# Altium footprint library Control_PCB_Lib.PcbLib: 28 footprints (part 1 of 2)
Each footprint in its own frame and in the unit in brackets; x right, y up, seen from the top. Pads: shape width x height; smd on the part's side, far side on the other; paste and mask are expansions set on the pad; w line width, h text height; cw(c..) or ccw(c..) is an arc to the next point about the centre after c.
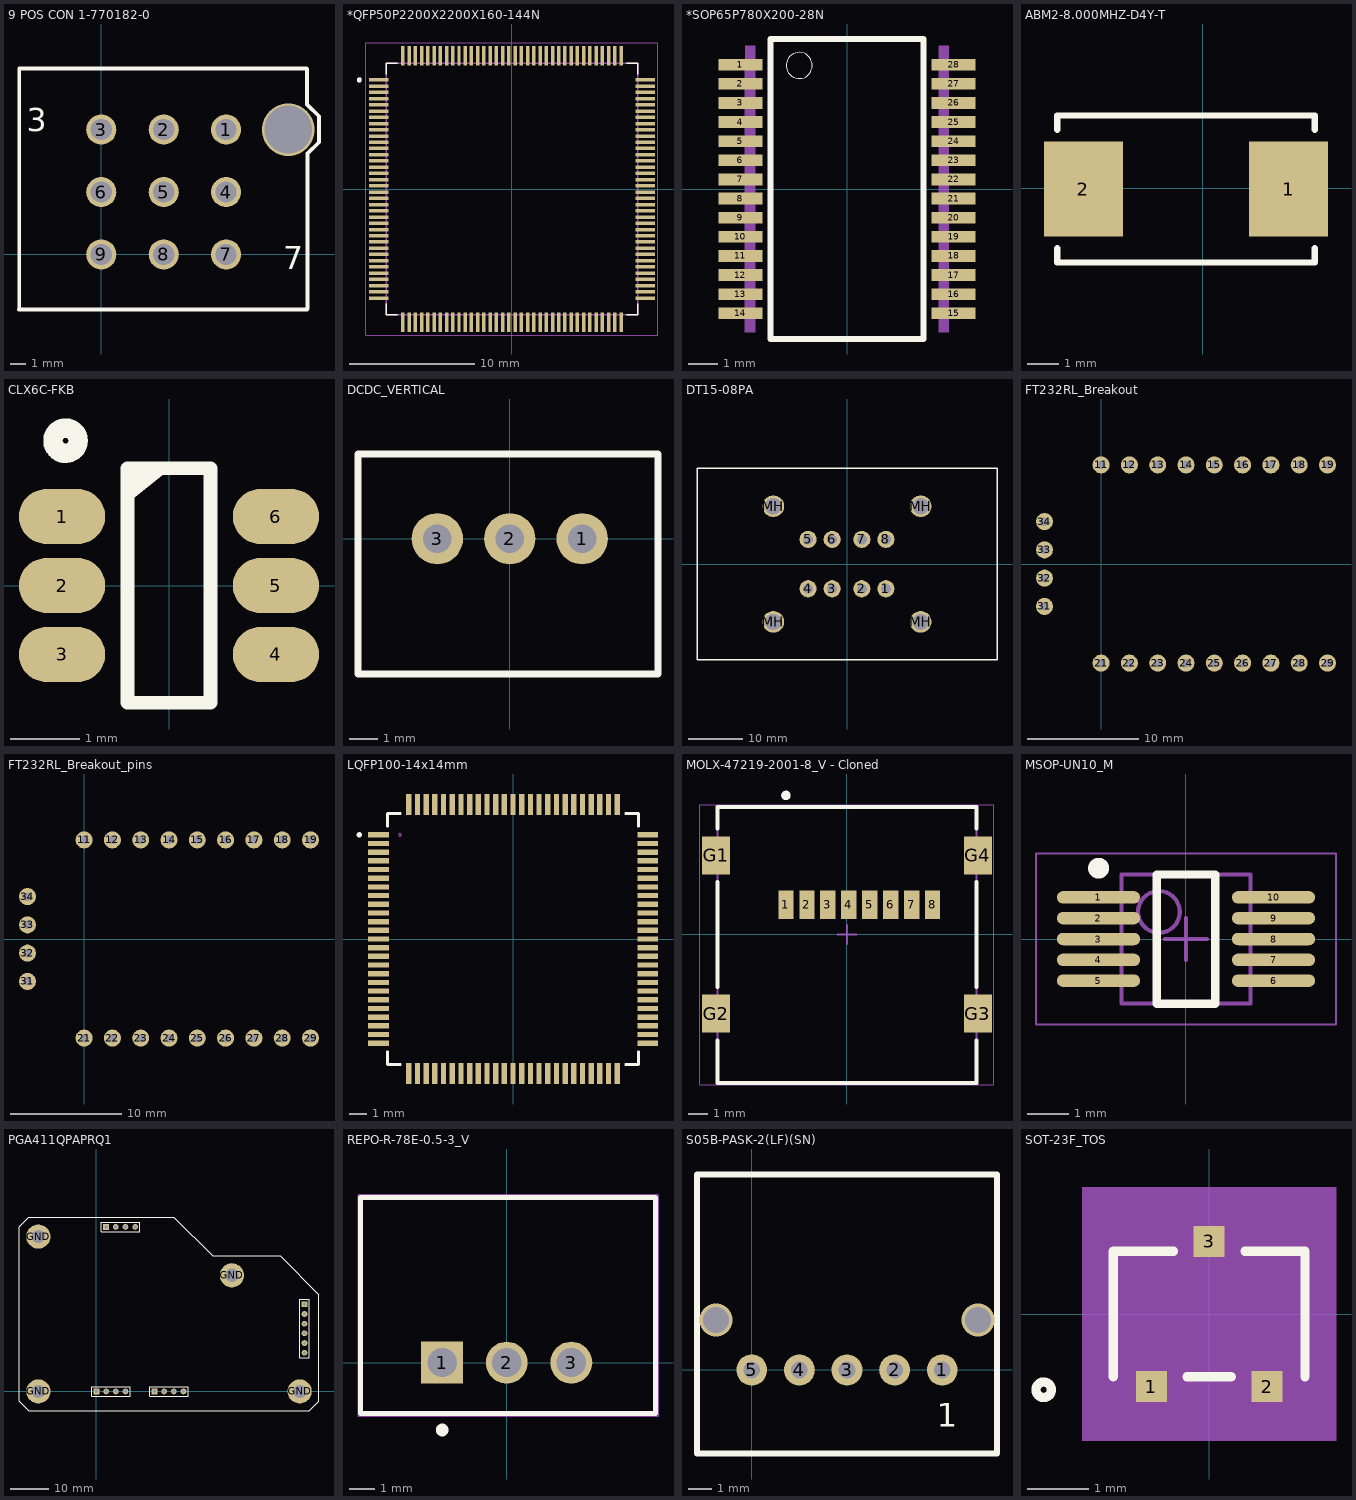
[diagram p0: the footprints below, top view; thin cyan lines are the x and y axes]

## 9 POS CON 1-770182-0 [mm] "TE CONN HEADER VERT 9POS 4.14MM"
height 13.49
pads (9):
  round 2 hole 1.4: 1(8.28,8.28) 2(4.14,8.28) 3(0,8.28) 4(8.28,4.14) 5(4.14,4.14) 6(0,4.14) 7(8.28,0) 8(4.14,0) 9(0,0)
via 12.4,8.28 diameter 3.5 hole 3.18
Top Overlay:
  lines w0.254: -5.443,12.326 13.607,12.326 ; -5.443,12.335 -5.443,-3.634 -5.459,-3.649 13.638,-3.649 13.689,-3.598 13.689,6.696 14.442,7.448 14.442,7.792 14.434,7.784 14.434,9.165 13.653,9.947 13.653,12.321
  text "3" at -4.957,8.164 h1.52
  text "7" at 12.058,-0.977 h1.52
3D body "c-1-770182-0-n-3d.stp": height 14.55, standoff -4.02, extent -5.476,-3.647 13.676,12.38

## *QFP50P2200X2200X160-144N [mm]
pads (144):
  rect 1.56x0.28 smd: 1(-10.68,8.75) 2(-10.68,8.25) 3(-10.68,7.75) 4(-10.68,7.25) 5(-10.68,6.75) 6(-10.68,6.25) 7(-10.68,5.75) 8(-10.68,5.25) 9(-10.68,4.75) 10(-10.68,4.25) 11(-10.68,3.75) 12(-10.68,3.25) 13(-10.68,2.75) 14(-10.68,2.25) 15(-10.68,1.75) 16(-10.68,1.25) 17(-10.68,0.75) 18(-10.68,0.25) 19(-10.68,-0.25) 20(-10.68,-0.75) 21(-10.68,-1.25) 22(-10.68,-1.75) 23(-10.68,-2.25) 24(-10.68,-2.75) 25(-10.68,-3.25) 26(-10.68,-3.75) 27(-10.68,-4.25) 28(-10.68,-4.75) 29(-10.68,-5.25) 30(-10.68,-5.75) 31(-10.68,-6.25) 32(-10.68,-6.75) 33(-10.68,-7.25) 34(-10.68,-7.75) 35(-10.68,-8.25) 36(-10.68,-8.75) 73(10.68,-8.75) 74(10.68,-8.25) 75(10.68,-7.75) 76(10.68,-7.25) 77(10.68,-6.75) 78(10.68,-6.25) 79(10.68,-5.75) 80(10.68,-5.25) 81(10.68,-4.75) 82(10.68,-4.25) 83(10.68,-3.75) 84(10.68,-3.25) 85(10.68,-2.75) 86(10.68,-2.25) 87(10.68,-1.75) 88(10.68,-1.25) 89(10.68,-0.75) 90(10.68,-0.25) 91(10.68,0.25) 92(10.68,0.75) 93(10.68,1.25) 94(10.68,1.75) 95(10.68,2.25) 96(10.68,2.75) 97(10.68,3.25) 98(10.68,3.75) 99(10.68,4.25) 100(10.68,4.75) 101(10.68,5.25) 102(10.68,5.75) 103(10.68,6.25) 104(10.68,6.75) 105(10.68,7.25) 106(10.68,7.75) 107(10.68,8.25) 108(10.68,8.75)
  rect 0.28x1.56 smd: 37(-8.75,-10.68) 38(-8.25,-10.68) 39(-7.75,-10.68) 40(-7.25,-10.68) 41(-6.75,-10.68) 42(-6.25,-10.68) 43(-5.75,-10.68) 44(-5.25,-10.68) 45(-4.75,-10.68) 46(-4.25,-10.68) 47(-3.75,-10.68) 48(-3.25,-10.68) 49(-2.75,-10.68) 50(-2.25,-10.68) 51(-1.75,-10.68) 52(-1.25,-10.68) 53(-0.75,-10.68) 54(-0.25,-10.68) 55(0.25,-10.68) 56(0.75,-10.68) 57(1.25,-10.68) 58(1.75,-10.68) 59(2.25,-10.68) 60(2.75,-10.68) 61(3.25,-10.68) 62(3.75,-10.68) 63(4.25,-10.68) 64(4.75,-10.68) 65(5.25,-10.68) 66(5.75,-10.68) 67(6.25,-10.68) 68(6.75,-10.68) 69(7.25,-10.68) 70(7.75,-10.68) 71(8.25,-10.68) 72(8.75,-10.68) 109(8.75,10.68) 110(8.25,10.68) 111(7.75,10.68) 112(7.25,10.68) 113(6.75,10.68) 114(6.25,10.68) 115(5.75,10.68) 116(5.25,10.68) 117(4.75,10.68) 118(4.25,10.68) 119(3.75,10.68) 120(3.25,10.68) 121(2.75,10.68) 122(2.25,10.68) 123(1.75,10.68) 124(1.25,10.68) 125(0.75,10.68) 126(0.25,10.68) 127(-0.25,10.68) 128(-0.75,10.68) 129(-1.25,10.68) 130(-1.75,10.68) 131(-2.25,10.68) 132(-2.75,10.68) 133(-3.25,10.68) 134(-3.75,10.68) 135(-4.25,10.68) 136(-4.75,10.68) 137(-5.25,10.68) 138(-5.75,10.68) 139(-6.25,10.68) 140(-6.75,10.68) 141(-7.25,10.68) 142(-7.75,10.68) 143(-8.25,10.68) 144(-8.75,10.68)
Top Overlay:
  circle w0.2: c-12.25,8.75 r0.1
  lines w0.127: -10.1,-9.22 -10.1,-10.1 -9.22,-10.1 ; -10.1,9.22 -10.1,10.1 -9.22,10.1 ; 9.22,-10.1 10.1,-10.1 10.1,-9.22 ; 9.22,10.1 10.1,10.1 10.1,9.22
Mechanical 4:
  circle w0.2: c-12.25,8.75 r0.1
  circle w0.2: c-12.25,8.75 r0.1
  lines w0.127: -10.1,-10.1 10.1,-10.1 ; -10.1,-10.1 -10.1,10.1 ; -10.1,-10.1 10.1,-10.1 ; -10.1,-10.1 -10.1,10.1 ; -10.1,10.1 10.1,10.1 ; -10.1,10.1 10.1,10.1 ; 10.1,-10.1 10.1,10.1 ; 10.1,-10.1 10.1,10.1
Mechanical 16:
  lines w0.05: -11.71,-11.71 11.71,-11.71 11.71,11.71 -11.71,11.71 -11.71,-11.71
3D body "STM32H743ZIT6--3DModel-STEP-56544.STEP": height 1.56, standoff -0.04, extent -11.84,-11 10.16,11

## *SOP65P780X200-28N [mm]
pads (28):
  rect 1.5x0.4 smd: 1(-3.625,4.225) 2(-3.625,3.575) 3(-3.625,2.925) 4(-3.625,2.275) 5(-3.625,1.625) 6(-3.625,0.975) 7(-3.625,0.325) 8(-3.625,-0.325) 9(-3.625,-0.975) 10(-3.625,-1.625) 11(-3.625,-2.275) 12(-3.625,-2.925) 13(-3.625,-3.575) 14(-3.625,-4.225) 15(3.625,-4.225) 16(3.625,-3.575) 17(3.625,-2.925) 18(3.625,-2.275) 19(3.625,-1.625) 20(3.625,-0.975) 21(3.625,-0.325) 22(3.625,0.325) 23(3.625,0.975) 24(3.625,1.625) 25(3.625,2.275) 26(3.625,2.925) 27(3.625,3.575) 28(3.625,4.225)
Top Overlay:
  circle w0: c-1.625,4.2 r0.442
  lines w0.203: -2.6,-5.1 2.6,-5.1 2.6,5.1 -2.6,5.1 -2.6,-5.1
Mechanical 4:
  drawing of 56 lines, arcs and shapes, not listed
3D body "ssop28.stp": height 1.9, standoff 0, extent -3.773,-5.08 4.027,5.12

## ABM2-8.000MHZ-D4Y-T [mm] "CRYSTAL 8.0000MHZ 18PF SMD"
pads (2):
  rect 2.5x3 smd paste+0 mask+0: 1(2.715,-0.028) 2(-3.785,-0.028)
Top Overlay:
  lines w0.2: -4.61,-1.903 -4.61,-2.353 3.54,-2.353 3.54,-1.903 ; -4.61,1.847 -4.61,2.297 3.54,2.297 3.54,1.847
3D body "Crys_Abracon_ABM2-30_000MHZ-D4YF-T_eec.STEP": height 0.25, standoff 0, extent -5.135,-2.453 4.065,2.397

## CLX6C-FKB [mm]
pads (6):
  oval 1.25x0.8 smd: 1(-1.55,1) 2(-1.55,0) 3(-1.55,-1) 4(1.55,-1) 5(1.55,0) 6(1.55,1)
Top Overlay:
  circle w0.2: c-1.5,2.1 r0.141
  circle w0.2: c-1.5,2.1 r0.224
  region: -0.6,1.7 -0.1,1.6 -0.6,1.2
  lines w0.2: -0.6,-1.7 -0.6,1.7 0.6,1.7 0.6,-1.7 -0.6,-1.7
3D body: height 2.8, standoff 0, extent -1.7,-1.7 1.7,1.7

## DCDC_VERTICAL [mm]
pads (3):
  round 1.8 hole 1: 1(2.54,0) 2(0,0) 3(-2.54,0)
Top Overlay:
  lines w0.254: -5.325,-4.75 5.2,-4.75 5.2,2.975 -5.325,2.975 -5.325,-4.75
3D body "mps_dcdc_oki_78sr_a.step": height 17.18, standoff -2.63, extent -5.275,-4.867 5.139,2.867

## DT15-08PA [mil]
pads (12):
  round 125 hole 72: 1(282.5,-179.5) 2(107.5,-179.5) 3(-107.5,-179.5) 4(-282.5,-179.5) 5(-282.5,179.5) 7(107.5,179.5)
  round 125 hole 72.01: 6(-107.5,179.5) 8(282.5,179.5)
  round 157.48 hole 118.11: MH(-535,-420) MH(-535,420) MH(535,-420) MH(535,420)
Top Overlay:
  lines w10: -1089.57,-695.87 -1089.57,696.85 1087.6,696.85 1089.57,694.88 1089.57,-693.9 1087.6,-695.87 -1089.57,-695.87
  text "." at -1061.02,747.05 h60
3D body "c-dt15-08pa-99-3d.stp": height 1181.1, standoff -125.9, extent -1084.99,-694.98 1085.01,693.02

## FT232RL_Breakout [mil] "USB to Serial breakout pcb"
pads (22):
  round 60 hole 30: 11(0,350) 12(100,350) 13(200,350) 14(300,350) 15(400,350) 16(500,350) 17(600,350) 18(700,350) 19(800,350) 21(0,-350) 22(100,-350) 23(200,-350) 24(300,-350) 25(400,-350) 26(500,-350) 27(600,-350) 28(700,-350) 29(800,-350) 31(-200,-150) 32(-200,-50) 33(-200,50) 34(-200,150)
3D body: height 432.96, standoff 0, extent -250,-400 950,400

## FT232RL_Breakout_pins [mil] "USB to Serial breakout pcb"
pads (22):
  round 60 hole 30: 11(0,350) 12(100,350) 13(200,350) 14(300,350) 15(400,350) 16(500,350) 17(600,350) 18(700,350) 19(800,350) 21(0,-350) 22(100,-350) 23(200,-350) 24(300,-350) 25(400,-350) 26(500,-350) 27(600,-350) 28(700,-350) 29(800,-350) 31(-200,-150) 32(-200,-50) 33(-200,50) 34(-200,150)

## LQFP100-14x14mm [mil]
pads (100):
  rect 47x12 smd paste+0 mask+0: 1(-305.12,236.22) 2(-305.12,216.54) 3(-305.12,196.85) 4(-305.12,177.17) 5(-305.12,157.48) 6(-305.12,137.8) 7(-305.12,118.11) 8(-305.12,98.43) 9(-305.12,78.74) 10(-305.12,59.06) 11(-305.12,39.37) 12(-305.12,19.69) 13(-305.12,0) 14(-305.12,-19.68) 15(-305.12,-39.37) 16(-305.12,-59.06) 17(-305.12,-78.74) 18(-305.12,-98.43) 19(-305.12,-118.11) 20(-305.12,-137.8) 21(-305.12,-157.48) 22(-305.12,-177.17) 23(-305.12,-196.85) 24(-305.12,-216.54) 25(-305.12,-236.22) 51(305.12,-236.22) 52(305.12,-216.54) 53(305.12,-196.85) 54(305.12,-177.17) 55(305.12,-157.48) 56(305.12,-137.8) 57(305.12,-118.11) 58(305.12,-98.43) 59(305.12,-78.74) 60(305.12,-59.06) 61(305.12,-39.37) 62(305.12,-19.68) 63(305.12,0) 64(305.12,19.68) 65(305.12,39.37) 66(305.12,59.06) 67(305.12,78.74) 68(305.12,98.43) 69(305.12,118.11) 70(305.12,137.8) 71(305.12,157.48) 72(305.12,177.17) 73(305.12,196.85) 74(305.12,216.54) 75(305.12,236.22)
  rect 12x47 smd paste+0 mask+0: 26(-236.22,-305.12) 27(-216.54,-305.12) 28(-196.85,-305.12) 29(-177.17,-305.12) 30(-157.48,-305.12) 31(-137.8,-305.12) 32(-118.11,-305.12) 33(-98.43,-305.12) 34(-78.74,-305.12) 35(-59.06,-305.12) 36(-39.37,-305.12) 37(-19.68,-305.12) 38(0,-305.12) 39(19.68,-305.12) 40(39.37,-305.12) 41(59.06,-305.12) 42(78.74,-305.12) 43(98.43,-305.12) 44(118.11,-305.12) 45(137.8,-305.12) 46(157.48,-305.12) 47(177.17,-305.12) 48(196.85,-305.12) 49(216.54,-305.12) 50(236.22,-305.12) 76(236.22,305.12) 77(216.54,305.12) 78(196.85,305.12) 79(177.17,305.12) 80(157.48,305.12) 81(137.8,305.12) 82(118.11,305.12) 83(98.43,305.12) 84(78.74,305.12) 85(59.06,305.12) 86(39.37,305.12) 87(19.68,305.12) 88(0,305.12) 89(-19.68,305.12) 90(-39.37,305.12) 91(-59.06,305.12) 92(-78.74,305.12) 93(-98.43,305.12) 94(-118.11,305.12) 95(-137.8,305.12) 96(-157.48,305.12) 97(-177.17,305.12) 98(-196.85,305.12) 99(-216.54,305.12) 100(-236.22,305.12)
Top Overlay:
  circle w6: c-348.46,236.22 r3
  lines w6: -284.5,-255.32 -284.5,-284.5 -255.32,-284.5 ; -284.5,255.32 -284.5,284.5 -255.32,284.5 ; 255.32,-284.5 284.5,-284.5 284.5,-255.32 ; 255.32,284.5 284.5,284.5 284.5,255.32
Mechanical 13:
  circle w0: c-256.62,236.22 r3
3D body: height 10, standoff 0, extent 0,0 10,10
3D body "LQFP100-14x14mm.step": height 63.11, standoff 0, extent -314.45,-315.72 315.23,313.96

## MOLX-47219-2001-8_V - Cloned [mm] "CONN, 8-Leads, Body 14.5x13.6mm, Pitch 1.1mm"
height 1.9
pads (12):
  rect 0.8x1.5 smd: 1(-3.205,1.55) 2(-2.105,1.55) 3(-1.005,1.55) 4(0.095,1.55) 5(1.195,1.55) 6(2.295,1.55) 7(3.395,1.55) 8(4.495,1.55)
  rect 1.45x2 smd: G1(-6.875,4.15) G2(-6.875,-4.15) G3(6.875,-4.15) G4(6.875,4.15)
Top Overlay:
  circle w0.25: c-3.205,7.3 r0.125
  lines w0.2: -6.8,-5.55 -6.8,-7.8 6.8,-7.8 6.8,-5.55 ; -6.8,-2.75 -6.8,2.75 ; -6.8,5.55 -6.8,6.7 6.8,6.7 6.8,5.55 ; 6.8,-2.75 6.8,2.75
Mechanical 13:
  lines w0.1: -6.8,-7.8 -6.8,6.7 6.8,6.7 6.8,-7.8 -6.8,-7.8
Mechanical 15:
  lines w0.05: -7.725,-7.9 -7.725,6.8 7.7,6.8 7.7,-7.9 -7.725,-7.9
  lines w0.1: -0.5,0 0.5,0 ; 0,-0.5 0,0.5
3D body "472192001.stp": height 1.91, standoff 0.02, extent -7.3,-7.793 7.3,6.707

## MSOP-UN10_M [mm] "TSSOP, 10-Leads, Body 3x3mm, Pitch 0.5mm, IPC Low Density"
height 1.1
pads (10):
  oval 2x0.3 smd: 1(-2.1,1) 2(-2.1,0.5) 3(-2.1,0) 4(-2.1,-0.5) 5(-2.1,-1) 6(2.1,-1) 7(2.1,-0.5) 8(2.1,0) 9(2.1,0.5) 10(2.1,1)
Top Overlay:
  circle w0.25: c-2.1,1.7 r0.125
  lines w0.2: -0.7,-1.55 0.7,-1.55 0.7,1.55 -0.7,1.55 -0.7,-1.55
Mechanical 13:
  circle w0.1: c-0.65,0.65 r0.5
  lines w0.1: -1.55,-1.55 1.55,-1.55 1.55,1.55 -1.55,1.55 -1.55,-1.55
Mechanical 15:
  lines w0.05: -3.6,-2.05 3.6,-2.05 3.6,2.05 -3.6,2.05 -3.6,-2.05
  lines w0.1: -0.5,0 0.5,0 ; 0,-0.5 0,0.5
3D body: height 1.1, standoff 0, extent -1.55,-1.55 1.55,1.55

## PGA411QPAPRQ1 [mm] "Breakout board for RDC"
pads (22):
  round 6.35 hole 3.48: GND(-15.24,0) GND(-15.24,40.64) GND(35.56,30.48) GND(53.34,0)
  rect 1.5x1.5 hole 0.9: P1_1(2.54,43.18) P2_1(54.61,22.86) P3_1(0,0) P4_1(15.24,0)
  round 1.5 hole 0.9: P1_2(5.08,43.18) P1_3(7.62,43.18) P1_4(10.16,43.18) P2_2(54.61,20.32) P2_3(54.61,17.78) P2_4(54.61,15.24) P2_5(54.61,12.7) P2_6(54.61,10.16) P3_2(2.54,0) P3_3(5.08,0) P3_4(7.62,0) P4_2(17.78,0) P4_3(20.32,0) P4_4(22.86,0)
Top Overlay:
  lines w0.2: -1.27,-1.27 8.89,-1.27 8.89,1.27 -1.27,1.27 -1.27,-1.27 ; 1.27,41.91 1.27,44.45 11.43,44.45 11.43,41.91 1.27,41.91 ; 13.97,-1.27 24.13,-1.27 24.13,1.27 13.97,1.27 13.97,-1.27 ; 53.34,8.89 55.88,8.89 55.88,24.13 53.34,24.13 53.34,8.89
  lines w0.254: -20.32,-2.54 -20.32,43.18 -17.78,45.72 20.32,45.72 30.48,35.56 48.26,35.56 58.42,25.4 58.42,-2.54 55.88,-5.08 -17.78,-5.08 -20.32,-2.54
3D body "R2D_PCB.step": height 19.17, standoff 7.87, extent -20.32,-5.08 58.42,45.72
3D body "zl262-4s_p2-54_l10-6_w2-54_h8-5.stp": height 8.5, standoff -3, extent 13.72,-1.27 24.38,1.27
3D body "zl262-4s_p2-54_l10-6_w2-54_h8-5.stp": height 8.5, standoff -3, extent -1.52,-1.27 9.14,1.27
3D body "zl262-4s_p2-54_l10-6_w2-54_h8-5.stp": height 8.5, standoff -3, extent 1.02,41.91 11.68,44.45
3D body "zl262-6s_p2-54_l15-7_w2-54_h8-5.stp": height 8.5, standoff -3, extent 53.34,8.64 55.88,24.38

## REPO-R-78E-0.5-3_V [mm] "THD, 3-Leads, Body 11.6x8.5mm, Pitch 2.54mm"
height 10.4
pads (3):
  rect 1.65x1.65 hole 1.15: 1(-2.54,0)
  round 1.65 hole 1.15: 2(0,0) 3(2.54,0)
Top Overlay:
  circle w0.25: c-2.54,-2.65 r0.125
  lines w0.2: -5.75,-2 5.85,-2 5.85,6.5 -5.75,6.5 -5.75,-2
Mechanical 13:
  lines w0.1: -5.75,-2 -5.75,6.5 5.85,6.5 5.85,-2 -5.75,-2
Mechanical 15:
  lines w0.05: -5.85,-2.1 -5.85,6.6 5.95,6.6 5.95,-2.1 -5.85,-2.1
  lines w0.1: -0.5,0 0.5,0 ; 0,-0.5 0,0.5
3D body: height 0.51, standoff -4.61, extent -0.25,-0.125 0.25,0.125
3D body: height 0.51, standoff -4.61, extent 2.29,-0.125 2.79,0.125
3D body: height 0.51, standoff -4.61, extent -2.79,-0.125 -2.29,0.125
3D body: height 10.4, standoff 0.51, extent -5.749,-1.999 5.849,6.499

## S05B-PASK-2(LF)(SN) [mm] "CONN HEADER R/A 5POS 2MM"
height 7
pads (5):
  round 1.3 hole 0.7: 1(8,0) 2(6,0) 3(4,0) 4(2,0) 5(0,0)
via -1.5,2.1 diameter 1.4 hole 1.1
via 9.5,2.1 diameter 1.4 hole 1.1
Top Overlay:
  lines w0.254: -2.3,-3.5 10.3,-3.5 10.3,8.2 -2.3,8.2 -2.3,-3.5
  text "1" at 7.77,-2.39 h1

## SOT-23F_TOS [mil]
pads (3):
  rect 20x20 smd paste+0 mask+0: 1(-37.4,-47) 2(37.4,-47) 3(0,47)
Top Overlay:
  circle w6: c-107,-49 r5
  lines w6: -62,-40.5 -62,40.5 -23.1,40.5 ; -14.3,-40.5 14.3,-40.5 ; 23.1,40.5 62,40.5 62,-40.5
Mechanical 5:
  region: -82,82 82,82 82,-82 -82,-82
Mechanical 13:
  circle w0: c-47,-25.5 r5
  lines w1: -57,-35.5 -57,35.5 57,35.5 57,-35.5 -57,-35.5 ; -47.4,-49 -27.4,-49 -27.4,-35.5 -47.4,-35.5 -47.4,-49 ; -10,35.5 -10,49 10,49 10,35.5 -10,35.5 ; 27.4,-49 47.4,-49 47.4,-35.5 27.4,-35.5 27.4,-49
Mechanical 15:
  region: 57,-35.5 -57,-35.5 -57,35.5 57,35.5
  region: -67,-45.5 -67,45.5 -20,45.5 -20,67 20,67 20,45.5 67,45.5 67,-45.5 57.4,-45.5 57.4,-67 -57.4,-67 -57.4,-45.5
  lines w6: -67,-45.5 -57.4,-45.5 -57.4,-67 57.4,-67 57.4,-45.5 67,-45.5 67,45.5 20,45.5 20,67 -20,67 -20,45.5 -67,45.5 -67,-45.5
3D body "SOT-23F.STEP": height 31.5, standoff 0, extent -56.45,-44.95 57.73,49.54
3D body: height 10, standoff 0, extent 0,0 10,10